# Altium schematic symbol library C_DNP.SchLib: 1 symbol
Pins are listed as number, name and electrical type; pins without a type are passive.

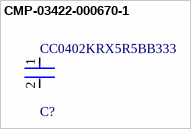
[diagram p0: symbol CMP-03422-000670-1]

## CMP-03422-000670-1
designator C?, comment CC0402KRX5R5BB333
CAP CER 0.033UF 6.3V X5R 0402; Manufacturer: YAGEO; Value: 33 nF; Temperature Coefficient: 30ppm/°C; Tolerance: 0.1; Automotive Grade: NA; Material: Ceramic; Manufacturer Part Number: CC0402KRX5R5BB333; RoHS: TRUE; Voltage Rating: 6.3 V; Digikey Description: CAP CER 0.033UF 6.3V X5R 0402; Footprint Url: http://www.yageo.com/exep/pages/download/literatures/UPY-C_GEN_24.pdf; Package: CC0402; Octopart: https://octopart.com/cc0402krx5r5bb333-yageo-71334363; ComponentLink2URL: http://www.yageo.com/documents/recent/UPY-GP_NP0_16V-to-50V_16.pdf; Device Class L3: Ceramic Capacitors; Temperature: -55°C to +125°C; Capacitance: 33 nF; Height: 0.55mm; Temperature Range High: +125°C; Temperature Range Low: -55°C; Automotive: No; Device Class L1: Passive Components; Lead Free: Yes; Temperature Characteristic: X5R; Device Class L2: Capacitors; Ipc Land Pattern Name: CAPC10050X50; Category: Cap; ComponentLink2Description: Datasheet
footprint FP-CC0402-IPC_C
footprint FP-CC0402-MFG
footprint FP-CC0402-IPC_B
footprint FP-CC0402-IPC_A
pins: 1, 2